# Altium integrated library TPS74801DRCR.IntLib: 1 symbol
Pins are listed as number, name and electrical type; pins without a type are passive.

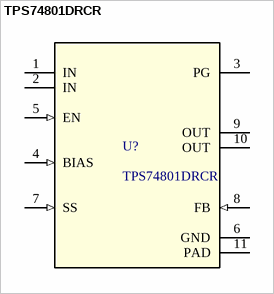
[diagram p0: symbol TPS74801DRCR]

## TPS74801DRCR
designator U?
Linear Voltage Regulator IC Positive Adjustable 1 Output 1.5A 10-VSON (3x3); Manufacturer Name: Texas Instruments; Manufacturer Part Number: TPS74801DRCR; Application_BuildNumber: *; PackageReference: DRC0010A; MountType: SMT; CompType: IC; RoHS: Y; Manufacturer: Texas Instruments
footprint DRC0010A
pins: 1 IN (power), 2 IN (power), 3 PG (oc), 4 BIAS (in), 5 EN (in), 6 GND (power), 7 SS (in), 8 FB (in), 9 OUT (power), 10 OUT (power), 11 PAD (power)